# Altium footprint library Connector-KF2EDGK.PcbLib: 91 footprints (part 6 of 6)
Each footprint in its own frame and in the unit in brackets; x right, y up, seen from the top. Pads: shape width x height; smd on the part's side, far side on the other; paste and mask are expansions set on the pad; w line width, h text height; cw(c..) or ccw(c..) is an arc to the next point about the centre after c.
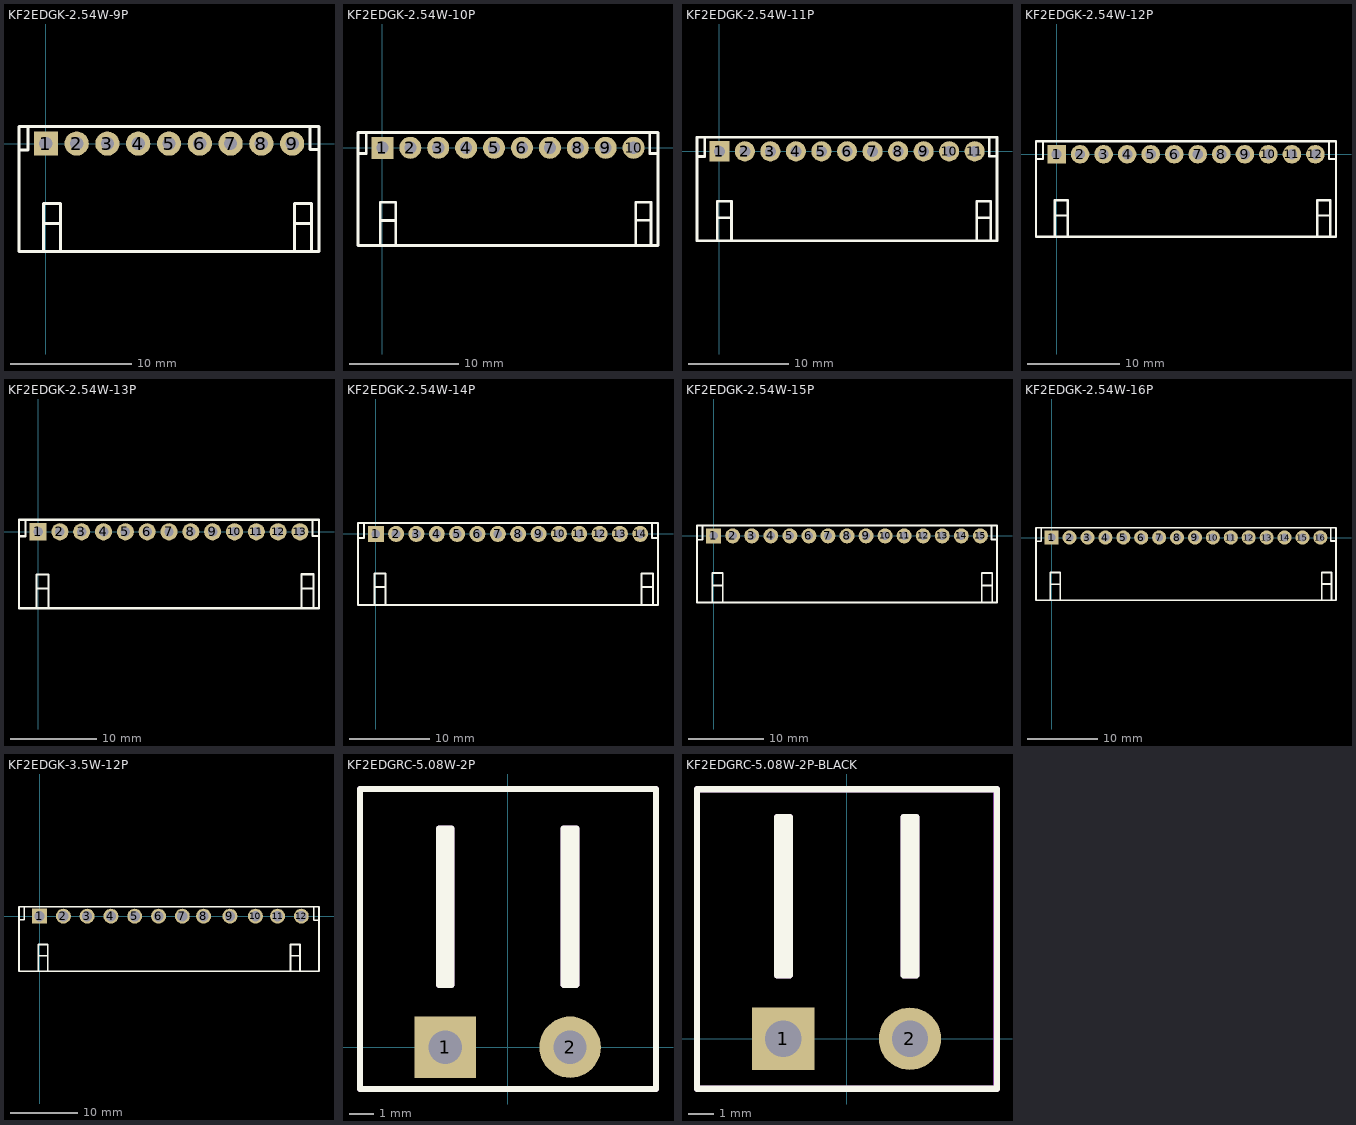
[diagram p5: the footprints below, top view; thin cyan lines are the x and y axes]

## KF2EDGK-2.54W-9P [mm]
pads (9):
  rect 2x2 hole 1.1: 1(0,0)
  round 2 hole 1.1: 2(2.54,0) 3(5.08,0) 4(7.62,0) 5(10.16,0) 6(12.7,0) 7(15.24,0) 8(17.78,0) 9(20.32,0)
Top Overlay:
  lines w0.254: -2.22,-0.518 -1.463,-0.518 -1.463,1.387 ; -2.22,1.387 -2.22,-8.9 22.54,-8.9 ; -2.22,1.397 22.54,1.397 22.54,-8.89 ; -0.188,-8.9 -0.188,-4.963 1.209,-4.963 1.209,-8.9 ; -0.188,-6.614 1.209,-6.614 ; 20.508,-8.89 20.508,-4.953 21.905,-4.953 21.905,-8.89 ; 20.508,-6.604 21.905,-6.604 ; 21.783,1.397 21.783,-0.508 22.54,-0.508
3D body "KF2EDGK-2.54W-9P.STEP": height 8.15, standoff -3.25, extent -2.261,-8.962 22.499,1.138

## KF2EDGK-2.54W-10P [mm] "长：27.3mm，宽：10.1mm，高：8.1mm"
pads (10):
  rect 2x2 hole 1.1: 1(0,0)
  round 2 hole 1.1: 2(2.54,0) 3(5.08,0) 4(7.62,0) 5(10.16,0) 6(12.7,0) 7(15.24,0) 8(17.78,0) 9(20.32,0) 10(22.86,0)
Top Overlay:
  lines w0.254: -2.22,-0.518 -1.463,-0.518 -1.463,1.387 ; -2.22,1.387 -2.22,-8.9 25.08,-8.9 ; -2.22,1.397 25.08,1.397 25.08,-8.89 ; -0.188,-8.9 -0.188,-4.963 1.209,-4.963 1.209,-8.9 ; -0.188,-6.614 1.209,-6.614 ; 23.048,-8.89 23.048,-4.953 24.445,-4.953 24.445,-8.89 ; 23.048,-6.604 24.445,-6.604 ; 24.323,1.397 24.323,-0.508 25.08,-0.508
3D body "KF2EDGK-2.54W-10P.STEP": height 8.15, standoff -3.25, extent -2.21,-8.957 25.09,1.143

## KF2EDGK-2.54W-11P [mm]
pads (11):
  rect 2x2 hole 1.1: 1(0,0)
  round 2 hole 1.1: 2(2.54,0) 3(5.08,0) 4(7.62,0) 5(10.16,0) 6(12.7,0) 7(15.24,0) 8(17.78,0) 9(20.32,0) 10(22.86,0) 11(25.4,0)
Top Overlay:
  lines w0.254: -2.22,-0.518 -1.463,-0.518 -1.463,1.387 ; -2.22,1.387 -2.22,-8.9 27.62,-8.9 ; -2.22,1.397 27.62,1.397 27.62,-8.89 ; -0.188,-8.9 -0.188,-4.963 1.209,-4.963 1.209,-8.9 ; -0.188,-6.614 1.209,-6.614 ; 25.588,-8.89 25.588,-4.953 26.985,-4.953 26.985,-8.89 ; 25.588,-6.604 26.985,-6.604 ; 26.863,1.397 26.863,-0.508 27.62,-0.508
3D body "KF2EDGK-2.54W-11P.STEP": height 8.15, standoff -3.25, extent -2.235,-8.957 27.605,1.143

## KF2EDGK-2.54W-12P [mm]
pads (12):
  rect 2x2 hole 1.1: 1(0,0)
  round 2 hole 1.1: 2(2.54,0) 3(5.08,0) 4(7.62,0) 5(10.16,0) 6(12.7,0) 7(15.24,0) 8(17.78,0) 9(20.32,0) 10(22.86,0) 11(25.4,0) 12(27.94,0)
Top Overlay:
  lines w0.254: -2.22,-0.518 -1.463,-0.518 -1.463,1.387 ; -2.22,1.387 -2.22,-8.9 30.16,-8.9 ; -2.22,1.397 30.16,1.397 30.16,-8.89 ; -0.188,-8.9 -0.188,-4.963 1.209,-4.963 1.209,-8.9 ; -0.188,-6.614 1.209,-6.614 ; 28.128,-8.89 28.128,-4.953 29.525,-4.953 29.525,-8.89 ; 28.128,-6.604 29.525,-6.604 ; 29.403,1.397 29.403,-0.508 30.16,-0.508
3D body "KF2EDGK-2.54W-12P.STEP": height 8.15, standoff -3.25, extent -2.235,-8.86 30.145,1.24

## KF2EDGK-2.54W-13P [mm]
pads (13):
  rect 2x2 hole 1.1: 1(0,0)
  round 2 hole 1.1: 2(2.54,0) 3(5.08,0) 4(7.62,0) 5(10.16,0) 6(12.7,0) 7(15.24,0) 8(17.78,0) 9(20.32,0) 10(22.86,0) 11(25.4,0) 12(27.94,0) 13(30.48,0)
Top Overlay:
  lines w0.254: -2.22,-0.518 -1.463,-0.518 -1.463,1.387 ; -0.188,-8.9 -0.188,-4.963 1.209,-4.963 1.209,-8.9 ; -0.188,-6.614 1.209,-6.614 ; 30.668,-8.89 30.668,-4.953 32.065,-4.953 32.065,-8.89 ; 30.668,-6.604 32.065,-6.604 ; 31.943,1.397 31.943,-0.508 32.7,-0.508 ; -2.22,-8.9 32.7,-8.9 32.7,-8.89 32.7,1.397 -2.22,1.397 -2.22,1.387 -2.22,-8.9
3D body "KF2EDGK-2.54W-13P.STEP": height 8.15, standoff -3.25, extent -2.184,-8.936 32.736,1.164

## KF2EDGK-2.54W-14P [mm]
pads (14):
  rect 2x2 hole 1.1: 1(0,0)
  round 2 hole 1.1: 2(2.54,0) 3(5.08,0) 4(7.62,0) 5(10.16,0) 6(12.7,0) 7(15.24,0) 8(17.78,0) 9(20.32,0) 10(22.86,0) 11(25.4,0) 12(27.94,0) 13(30.48,0) 14(33.02,0)
Top Overlay:
  lines w0.254: -2.22,-0.518 -1.463,-0.518 -1.463,1.387 ; -0.188,-8.9 -0.188,-4.963 1.209,-4.963 1.209,-8.9 ; -0.188,-6.614 1.209,-6.614 ; 33.208,-8.89 33.208,-4.953 34.605,-4.953 34.605,-8.89 ; 33.208,-6.604 34.605,-6.604 ; 34.483,1.397 34.483,-0.508 35.24,-0.508 ; -2.22,-8.9 35.24,-8.9 35.24,-8.89 35.24,1.397 -2.22,1.397 -2.22,1.387 -2.22,-8.9
3D body "KF2EDGK-2.54W-14P.STEP": height 8.15, standoff -3.25, extent -2.235,-8.911 35.225,1.189

## KF2EDGK-2.54W-15P [mm]
pads (15):
  rect 2x2 hole 1.1: 1(0,0)
  round 2 hole 1.1: 2(2.54,0) 3(5.08,0) 4(7.62,0) 5(10.16,0) 6(12.7,0) 7(15.24,0) 8(17.78,0) 9(20.32,0) 10(22.86,0) 11(25.4,0) 12(27.94,0) 13(30.48,0) 14(33.02,0) 15(35.56,0)
Top Overlay:
  lines w0.254: -2.22,-0.518 -1.463,-0.518 -1.463,1.387 ; -2.22,1.387 -2.22,-8.9 37.78,-8.9 37.78,-8.89 37.78,1.397 -2.22,1.397 ; -0.188,-8.9 -0.188,-4.963 1.209,-4.963 1.209,-8.9 ; -0.188,-6.614 1.209,-6.614 ; 35.748,-8.89 35.748,-4.953 37.145,-4.953 37.145,-8.89 ; 35.748,-6.604 37.145,-6.604 ; 37.023,1.397 37.023,-0.508 37.78,-0.508
3D body "KF2EDGK-2.54W-15P.STEP": height 8.15, standoff -3.25, extent -2.159,-8.86 37.841,1.24

## KF2EDGK-2.54W-16P [mm]
pads (16):
  rect 2x2 hole 1.1: 1(0,0)
  round 2 hole 1.1: 2(2.54,0) 3(5.08,0) 4(7.62,0) 5(10.16,0) 6(12.7,0) 7(15.24,0) 8(17.78,0) 9(20.32,0) 10(22.86,0) 11(25.4,0) 12(27.94,0) 13(30.48,0) 14(33.02,0) 15(35.56,0) 16(38.1,0)
Top Overlay:
  lines w0.254: -2.22,-0.518 -1.463,-0.518 -1.463,1.387 ; -0.188,-8.9 -0.188,-4.963 1.209,-4.963 1.209,-8.9 ; -0.188,-6.614 1.209,-6.614 ; 38.288,-8.89 38.288,-4.953 39.685,-4.953 39.685,-8.89 ; 38.288,-6.604 39.685,-6.604 ; 39.563,1.397 39.563,-0.508 40.32,-0.508 ; 40.32,1.387 -2.22,1.387 -2.22,-8.9 40.32,-8.9 40.32,1.397
3D body "KF2EDGK-2.54W-16P.STEP": height 8.15, standoff -3.25, extent -2.286,-8.987 40.254,1.113

## KF2EDGK-3.5W-12P [mm]
pads (12):
  rect 2.2x2.2 hole 1.5: 1(0,0)
  round 2.2 hole 1.5: 2(3.5,0) 3(7,0) 4(10.5,0) 5(14,0) 6(17.5,0) 7(21,0) 8(24.13,0) 9(28,0) 10(31.75,0) 11(35,0) 12(38.5,0)
Top Overlay:
  lines w0.254: -3.02,-0.518 -2.263,-0.518 -2.263,1.397 41.1,1.397 41.1,-8.1 -3.02,-8.1 -3.02,1.387 -2.273,1.387 ; -0.2,-8.1 -0.2,-4.163 1.197,-4.163 1.197,-8.1 ; -0.2,-5.814 1.197,-5.814 ; 36.9,-8.1 36.9,-4.163 38.297,-4.163 38.297,-8.1 ; 36.9,-5.814 38.297,-5.814 ; 40.343,1.305 40.343,-0.6 41.1,-0.6
3D body "c-1-284512-2-e1-3d.stp": height 7.25, standoff -3.4, extent -2.9,-7.9 41.1,1.3

## KF2EDGRC-5.08W-2P [mm] "闭口 KF2EDGRC-5.08-2P (KEFA(科发))"
pads (2):
  rect 2.5x2.5 hole 1.35: 1(-2.54,0)
  round 2.5 hole 1.35: 2(2.54,0)
Top Overlay:
  lines w0.254: -2.54,2.54 -2.54,8.89 ; 2.54,2.54 2.54,8.89 ; -2.54,8.89 -2.794,8.89 -2.794,2.54 -2.286,2.54 -2.286,8.89 -2.54,8.89 ; 2.54,8.89 2.794,8.89 2.794,2.54 2.286,2.54 2.286,8.89 2.54,8.89 ; -6,-1.7 -6,10.5 6.03,10.5 6.03,-1.7 -6,-1.7
Top Value:
  text "'.Comment'" at 0.873,-1.263 h3
Top Designator:
  text "'.Designator'" at 0.629,-3.247 h3
Top Assembly (Mech20):
  lines w0.254: -2.54,2.54 -2.54,8.89 ; 2.54,2.54 2.54,8.89 ; -2.54,8.89 -2.794,8.89 -2.794,2.54 -2.286,2.54 -2.286,8.89 -2.54,8.89 ; 2.54,8.89 2.794,8.89 2.794,2.54 2.286,2.54 2.286,8.89 2.54,8.89 ; -6,-1.7 -6,10.5 6.03,10.5 6.03,-1.7 -6,-1.7
3D body "KF2EDGRC-5.08-2P v1.step": height 8.35, standoff -3.95, extent -6.03,-1.7 6.03,10.5

## KF2EDGRC-5.08W-2P-BLACK [mm] "闭口 DB2ERC-5.08-2P-BK DORABO(地博电气)"
pads (2):
  rect 2.5x2.5 hole 1.45: 1(-2.54,0)
  round 2.5 hole 1.45: 2(2.54,0)
Top Overlay:
  lines w0.254: -2.54,2.54 -2.54,8.89 ; 2.54,2.54 2.54,8.89 ; -2.54,8.89 -2.794,8.89 -2.794,2.54 -2.286,2.54 -2.286,8.89 -2.54,8.89 ; 2.54,8.89 2.794,8.89 2.794,2.54 2.286,2.54 2.286,8.89 2.54,8.89 ; -6,-2 -6,10 6.03,10 6.03,-2 -6,-2
Top Value:
  text "'.Comment'" at 0.873,-1.263 h3
Top Designator:
  text "'.Designator'" at 0.629,-3.192 h3
Top Assembly (Mech20):
  lines w0.254: -2.54,2.54 -2.54,8.89 ; 2.54,2.54 2.54,8.89 ; 6,-2 6,10 ; 6.03,-2 -6,-2 -6,10 6.03,10 ; -2.54,8.89 -2.794,8.89 -2.794,2.54 -2.286,2.54 -2.286,8.89 -2.54,8.89 ; 2.54,8.89 2.794,8.89 2.794,2.54 2.286,2.54 2.286,8.89 2.54,8.89
3D body "db2erc-508-2p-bk.step": height 8.75, standoff -3.4, extent -5.82,-2 5.84,10
3D body "db2ek-508-2p-right-bk.step": height 15.2, standoff 0, extent -5.08,1.8 5.08,20